# Altium footprint library KJ_Turret.PcbLib: 18 footprints (part 1 of 2)
Each footprint in its own frame and in the unit in brackets; x right, y up, seen from the top. Pads: shape width x height; smd on the part's side, far side on the other; paste and mask are expansions set on the pad; w line width, h text height; cw(c..) or ccw(c..) is an arc to the next point about the centre after c.
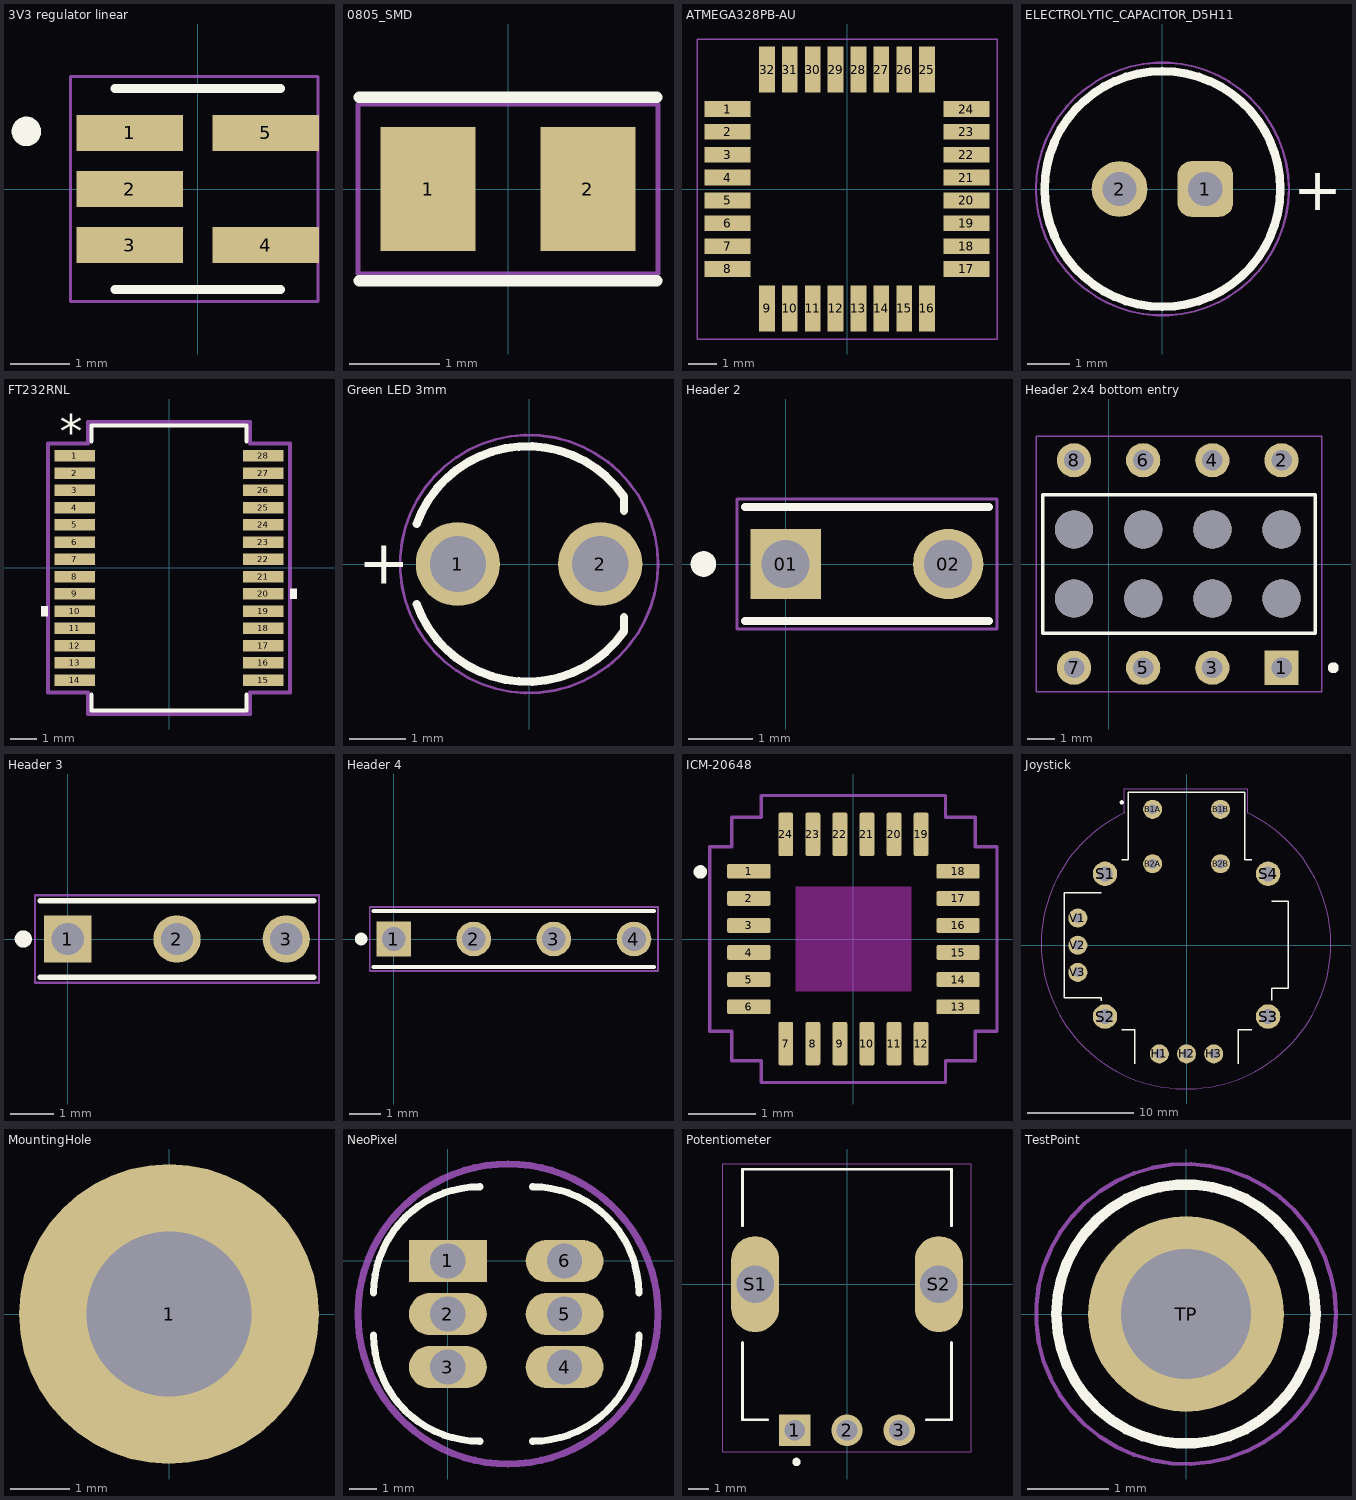
[diagram p0: the footprints below, top view; thin cyan lines are the x and y axes]

## 3V3 regulator linear [mm]
pads (5):
  rect 1.805x0.612 smd paste+0 mask+0: 1(-1.15,0.95) 2(-1.15,0) 3(-1.15,-0.95) 4(1.15,-0.95) 5(1.15,0.95)
Top Overlay:
  circle w0.25: c-2.903,0.975 r0.125
  lines w0.15: -1.4,-1.7 1.4,-1.7 ; -1.4,1.7 1.4,1.7
Mechanical 15:
  lines w0.051: -2.159,-1.905 2.032,-1.905 2.032,1.905 -2.159,1.905 -2.159,-1.905

## 0805_SMD [mm]
pads (2):
  rect 1.05x1.38 smd: 1(-0.888,0) 2(0.888,0)
Top Overlay:
  lines w0.127: -1.651,-1.016 1.651,-1.016 ; -1.651,1.016 1.651,1.016
Mechanical 15:
  lines w0.05: -1.665,-0.94 -1.665,0.94 1.665,0.94 1.665,-0.94 -1.665,-0.94
3D body "step_temp.STEP": height 1.35, standoff 0, extent -1,-0.625 1,0.625

## ATMEGA328PB-AU [mm]
pads (32):
  rect 1.6x0.55 smd mask+0.064: 1(-4.18,2.8) 2(-4.18,2) 3(-4.18,1.2) 4(-4.18,0.4) 5(-4.18,-0.4) 6(-4.18,-1.2) 7(-4.18,-2) 8(-4.18,-2.8) 17(4.18,-2.8) 18(4.18,-2) 19(4.18,-1.2) 20(4.18,-0.4) 21(4.18,0.4) 22(4.18,1.2) 23(4.18,2) 24(4.18,2.8)
  rect 0.55x1.6 smd mask+0.064: 9(-2.8,-4.18) 10(-2,-4.18) 11(-1.2,-4.18) 12(-0.4,-4.18) 13(0.4,-4.18) 14(1.2,-4.18) 15(2,-4.18) 16(2.8,-4.18) 25(2.8,4.18) 26(2,4.18) 27(1.2,4.18) 28(0.4,4.18) 29(-0.4,4.18) 30(-1.2,4.18) 31(-2,4.18) 32(-2.8,4.18)
Mechanical 15:
  lines w0.05: -5.25,-5.25 -5.25,5.25 5.25,5.25 5.25,-5.25 -5.25,-5.25
3D body "step_temp.STEP": height 1.2, standoff 0, extent -4.5,-4.5 4.5,4.5

## ELECTROLYTIC_CAPACITOR_D5H11 [mm] "Aluminum Electrolytic Capacitors, 5x11mm"
height 11
pads (2):
  rrect50% 1.3x1.3 hole 0.8: 1(1,0)
  round 1.3 hole 0.8: 2(-1,0)
Top Overlay:
  circle w0.2: c0,0 r2.75
  text "+" at 3.05,-0.5 h1
Mechanical 15:
  circle w0.05: c0,0 r2.95
3D body "5x11x2x0.5.stp": height 11.31, standoff -19.91, extent -2.49,-2.5 2.5,2.499

## FT232RNL [mil]
pads (28):
  rect 59.5x17 smd paste+0 mask+0: 1(-139.75,166.34) 2(-139.75,140.75) 3(-139.75,115.16) 4(-139.75,89.57) 5(-139.75,63.98) 6(-139.75,38.39) 7(-139.75,12.8) 8(-139.75,-12.8) 9(-139.75,-38.39) 10(-139.75,-63.98) 11(-139.75,-89.57) 12(-139.75,-115.16) 13(-139.75,-140.75) 14(-139.75,-166.34) 15(139.75,-166.34) 16(139.75,-140.75) 17(139.75,-115.16) 18(139.75,-89.57) 19(139.75,-63.98) 20(139.75,-38.39) 21(139.75,-12.8) 22(139.75,12.8) 23(139.75,38.39) 24(139.75,63.98) 25(139.75,89.57) 26(139.75,115.16) 27(139.75,140.75) 28(139.75,166.34)
Top Overlay:
  region: -179.5,-56.48 -189.5,-56.48 -189.5,-71.48 -179.5,-71.48
  region: 179.5,-30.89 189.5,-30.89 189.5,-45.89 179.5,-45.89
  lines w6: -115,-187.94 -115,-211.5 115,-211.5 115,-187.94 ; -115,187.94 -115,211.5 115,211.5 115,187.94
  text "*" at -162.25,178.34 h50
Mechanical 15:
  lines w6: -179.5,-184.84 -120,-184.84 -120,-216.5 120,-216.5 120,-184.84 179.5,-184.84 179.5,184.84 120,184.84 120,216.5 -120,216.5 -120,184.84 -179.5,184.84 -179.5,-184.84
3D body "SSOP-28_FTD.step": height 79.09, standoff 0, extent -155.51,-206.5 155.51,206.5

## Green LED 3mm [mm] "THT Mono-color Round Color LED, 2-leads"
height 5.3
pads (2):
  round 1.5 hole 1: 1(-1.27,0) 2(1.27,0)
Top Overlay:
  lines w0.15: -2.003,-0.719 ccw(c-0.03,0) 1.694,-1.199 1.694,-0.95 ; -2.003,0.719 cw(c-0.03,0) 1.694,1.199 1.694,0.95
  text "+" at -3.05,-0.35 h0.8
Mechanical 15:
  circle w0.05: c0,0 r2.3
3D body "15103xxx.stp": height 5.35, standoff -26.35, extent -1.991,-1.974 1.629,1.974

## Header 2 [mm]
pads (2):
  rect 1.1x1.1 / inner round 1.1 / far side rect 1.1x1.1 hole 0.75: 01(0,0)
  round 1.1 hole 0.75: 02(2.54,0)
Top Overlay:
  circle w0.2: c-1.285,0 r0.1
  lines w0.127: -0.635,-0.889 3.175,-0.889 ; -0.635,0.889 3.175,0.889
Mechanical 15:
  lines w0.05: -0.762,-1.016 -0.762,1.016 3.302,1.016 3.302,-1.016 -0.762,-1.016

## Header 2x4 bottom entry [mm]
height 7
pads (16):
  rect 1.258x1.258 / inner round 1.258 / far side rect 1.258x1.258 hole 0.75: 1(6.35,-3.81)
  round 1.258 hole 0.75: 2(6.35,3.81) 3(3.81,-3.81) 4(3.81,3.81) 5(1.27,-3.81) 6(1.27,3.81) 7(-1.27,-3.81) 8(-1.27,3.81)
  round 1.4 hole 1.4 unplated: ""(-1.27,-1.27) ""(-1.27,1.27) ""(1.27,-1.27) ""(1.27,1.27) ""(3.81,-1.27) ""(3.81,1.27) ""(6.35,-1.27) ""(6.35,1.27)
Top Overlay:
  circle w0.2: c8.25,-3.81 r0.1
  lines w0.127: -2.413,-2.54 -2.413,2.54 7.58,2.54 7.58,-2.54 -2.413,-2.54
Mechanical 15:
  lines w0.05: -2.667,-4.689 -2.667,4.689 7.83,4.689 7.83,-4.689 -2.667,-4.689
3D body "HeaderBottom v1.step": height 7.13, standoff -2.77, extent -2.5,-3.91 7.58,3.91

## Header 3 [mm]
pads (3):
  rect 1.1x1.1 / inner round 1.1 / far side rect 1.1x1.1 hole 0.75: 1(0,0)
  round 1.1 hole 0.75: 2(2.54,0) 3(5.08,0)
Top Overlay:
  circle w0.2: c-1.031,0 r0.1
  lines w0.127: -0.635,-0.889 5.715,-0.889 ; -0.635,0.889 5.715,0.889
Mechanical 15:
  lines w0.051: -0.762,-1.016 5.842,-1.016 5.842,1.016 -0.762,1.016 -0.762,-1.016

## Header 4 [mm]
pads (4):
  rect 1.1x1.1 / inner round 1.1 / far side rect 1.1x1.1 hole 0.75: 1(0,0)
  round 1.1 hole 0.75: 2(2.54,0) 3(5.08,0) 4(7.62,0)
Top Overlay:
  circle w0.2: c-1.031,0 r0.1
  lines w0.127: -0.635,-0.889 8.255,-0.889 ; -0.635,0.889 8.255,0.889
Mechanical 15:
  lines w0.051: -0.762,-1.016 -0.762,1.016 8.382,1.016 8.382,-1.016 -0.762,-1.016

## ICM-20648 [mm]
pads (24):
  rrect25% 0.64x0.22 smd: 1(-1.545,1) 2(-1.545,0.6) 3(-1.545,0.2) 4(-1.545,-0.2) 5(-1.545,-0.6) 6(-1.545,-1) 13(1.545,-1) 14(1.545,-0.6) 15(1.545,-0.2) 16(1.545,0.2) 17(1.545,0.6) 18(1.545,1)
  rrect25% 0.22x0.64 smd: 7(-1,-1.545) 8(-0.6,-1.545) 9(-0.2,-1.545) 10(0.2,-1.545) 11(0.6,-1.545) 12(1,-1.545) 19(1,1.545) 20(0.6,1.545) 21(0.2,1.545) 22(-0.2,1.545) 23(-0.6,1.545) 24(-1,1.545)
Top Layer keep-out:
  region: 0.85,-0.77 -0.85,-0.77 -0.85,0.77 0.85,0.77
Top Overlay:
  circle w0.1: c-2.261,0.991 r0.05
Keep-Out Layer:
  region: 0.85,-0.77 -0.85,-0.77 -0.85,0.77 0.85,0.77
Mechanical 15:
  lines w0.05: -2.12,-1.36 -2.12,1.36 -1.8,1.36 -1.8,1.8 -1.36,1.8 -1.36,2.12 1.36,2.12 1.36,1.8 1.8,1.8 1.8,1.36 2.12,1.36 2.12,-1.36 1.8,-1.36 1.8,-1.8 1.36,-1.8 1.36,-2.12 -1.36,-2.12 -1.36,-1.8 -1.8,-1.8 -1.8,-1.36 -2.12,-1.36
3D body "ICM-20648.STEP": height 0.93, standoff -0.02, extent -1.5,-1.5 1.5,1.5

## Joystick [mil]
pads (14):
  round 70 hole 35.43: B1A(-125,500) B1B(125,500) B2A(-125,300) B2B(125,300)
  round 70 hole 35: H1(-100,-400) H2(0,-400) H3(100,-400) V1(-400,100) V2(-400,0) V3(-400,-100)
  round 90 hole 55: S1(-300,262.5) S2(-300,-262.5) S3(300,-262.5) S4(300,262.5)
Top Overlay:
  circle w7.87: c-238.19,525.59 r3.94
  lines w5: -312.99,-203.54 -312.99,-192.91 -450,-192.91 -450,192.91 -312.99,192.91 ; -238.98,-311.02 -190.94,-311.02 -190.94,-437.01 ; -238.98,314.96 -214.57,314.96 -214.57,562.99 214.57,562.99 214.57,314.96 239.37,314.96 ; 190.94,-437.01 190.94,-311.02 239.37,-311.02 ; 312.99,-201.57 312.99,-157.48 374.02,-157.48 374.02,161.42 312.99,161.42
Mechanical 15:
  lines w1.97: -228.35,486.22 -228.35,574.8 224.41,574.8 224.41,486.22 ; -227.17,486.77 ccw(c-1.97,3.83) 223.23,486.77
3D body "COM-09032.STEP": height 1190, standoff -174.85, extent -520,-523.08 530,563.75

## MountingHole [mil]
pads (1):
  round 200 hole 110: 1(0,0)

## NeoPixel [mil]
pads (6):
  rect 110x60 / inner rect 100x60 / far side rect 110x60 hole 50: 1(0,0)
  oval 110x60 / inner oval 100x60 / far side oval 110x60 hole 50: 2(0,-75) 3(0,-150) 4(165,-150) 5(165,-75) 6(165,0)
Top Overlay:
  lines w10: -105,-105 ccw(c45,-105) 45,-255 ; -105,-45 cw(c45,-45) 45,105 ; 120,-255 ccw(c120,-105) 270,-105 ; 120,105 cw(c120,-45) 270,-45
Mechanical 15:
  circle w10: c85,-75 r212.13

## Potentiometer [mm]
height 26.8
pads (5):
  rect 1.508x1.508 / inner round 1.508 / far side rect 1.508x1.508 hole 1: 1(-2.5,-7)
  round 1.508 hole 1: 2(0,-7) 3(2.5,-7)
  oval 2.3x4.6 hole 1.8 square: S1(-4.4,0) S2(4.4,0)
Top Overlay:
  circle w0.2: c-2.418,-8.514 r0.1
  lines w0.127: -5,-2.8 -5,-6.5 -3.8,-6.5 ; -5,2.8 -5,5.5 5,5.5 5,2.8 ; 3.8,-6.5 5,-6.5 5,-2.8
Mechanical 15:
  lines w0.05: -5.95,-8.03 -5.95,5.75 5.95,5.75 5.95,-8.03 -5.95,-8.03
3D body "PT01-D120K2-B103.STEP": height 18.6, standoff -6.15, extent -5.636,-7.081 5.636,5.569

## TestPoint [mm]
height 5.59
pads (1):
  round 2.4 hole 1.6: TP(0,0)
Top Overlay:
  circle w0.127: c0,0 r1.59
Mechanical 15:
  circle w0.05: c0,0 r1.84
3D body "step_temp.STEP": height 5.59, standoff -3.3, extent -1.587,-1.587 1.587,1.587